# Altium footprint library ICS-43434_C5656610.PcbLib: 1 footprints
Each footprint in its own frame and in the unit in brackets; x right, y up, seen from the top. Pads: shape width x height; smd on the part's side, far side on the other; paste and mask are expansions set on the pad; w line width, h text height; cw(c..) or ccw(c..) is an arc to the next point about the centre after c.
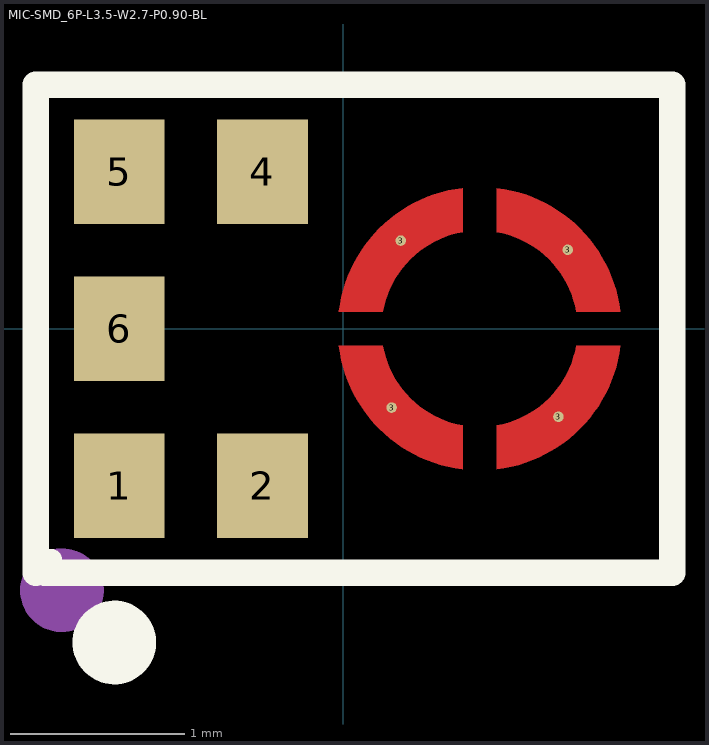
[diagram p0: the footprint, top view; thin cyan lines are the x and y axes]

## MIC-SMD_6P-L3.5-W2.7-P0.90-BL [mm] "1.65V~3.63V 停产 指向性:全指向 信噪比:64dB 灵敏度:-26dB 阻抗:- 型号:ICS-43434_C5656610 LCSC C5656610 厂牌:TDK InvenSense(应美盛)"
height 1
pads (9):
  rect 0.52x0.6 smd mask+0.05: 1(-1.286,-0.9) 2(-0.464,-0.9) 4(-0.464,0.9) 5(-1.286,0.9) 6(-1.286,0)
  round 0.06 smd mask+0: 3(0.276,-0.452) 3(0.329,0.505) 3(1.233,-0.505) 3(1.286,0.452)
Top Layer:
  region: -0.026,0.098 0.227,0.098 0.234,0.131 0.243,0.165 0.254,0.197 0.267,0.229 0.282,0.26 0.299,0.29 0.317,0.319 0.338,0.347 0.36,0.373 0.383,0.398 0.408,0.422 0.435,0.444 0.462,0.464 0.491,0.483 0.521,0.499 0.552,0.514 0.584,0.527 0.617,0.538 0.65,0.547 0.683,0.554 0.683,0.806 0.682,0.807 0.641,0.801 0.601,0.793 0.561,0.782 0.521,0.77 0.482,0.756 0.444,0.74 0.406,0.721 0.37,0.701 0.335,0.679 0.301,0.656 0.268,0.63 0.236,0.603 0.206,0.575 0.178,0.545 0.151,0.513 0.125,0.48 0.102,0.446 0.08,0.411 0.06,0.375 0.042,0.337 0.025,0.299 0.011,0.26 -0.001,0.221 -0.011,0.181 -0.02,0.14 -0.026,0.099
  region: 0.684,-0.807 0.684,-0.555 0.683,-0.554 0.65,-0.547 0.617,-0.538 0.584,-0.527 0.552,-0.514 0.521,-0.499 0.491,-0.483 0.462,-0.464 0.435,-0.444 0.408,-0.422 0.383,-0.398 0.36,-0.373 0.338,-0.347 0.317,-0.319 0.299,-0.29 0.282,-0.26 0.267,-0.229 0.254,-0.197 0.243,-0.165 0.234,-0.131 0.227,-0.098 -0.025,-0.098 -0.026,-0.099 -0.02,-0.14 -0.011,-0.18 -0.001,-0.221 0.011,-0.26 0.025,-0.299 0.042,-0.337 0.06,-0.375 0.08,-0.411 0.102,-0.446 0.125,-0.48 0.151,-0.513 0.178,-0.545 0.206,-0.575 0.236,-0.603 0.268,-0.63 0.301,-0.656 0.335,-0.679 0.37,-0.701 0.406,-0.721 0.444,-0.739 0.482,-0.756 0.521,-0.77 0.561,-0.782 0.601,-0.793 0.641,-0.801 0.682,-0.807
  region: 1.588,-0.098 1.336,-0.098 1.329,-0.131 1.32,-0.165 1.309,-0.197 1.296,-0.229 1.281,-0.26 1.264,-0.29 1.245,-0.319 1.225,-0.347 1.203,-0.373 1.179,-0.398 1.154,-0.422 1.128,-0.444 1.1,-0.464 1.071,-0.483 1.041,-0.499 1.01,-0.514 0.978,-0.527 0.946,-0.538 0.913,-0.547 0.879,-0.554 0.879,-0.806 0.88,-0.807 0.921,-0.801 0.962,-0.793 1.002,-0.782 1.042,-0.77 1.08,-0.756 1.119,-0.74 1.156,-0.721 1.192,-0.701 1.227,-0.679 1.262,-0.656 1.294,-0.63 1.326,-0.603 1.356,-0.575 1.385,-0.545 1.412,-0.513 1.437,-0.48 1.461,-0.446 1.482,-0.411 1.503,-0.375 1.521,-0.338 1.537,-0.299 1.551,-0.26 1.564,-0.221 1.574,-0.181 1.582,-0.14 1.588,-0.099
  region: 0.879,0.807 0.879,0.554 0.913,0.547 0.946,0.538 0.978,0.527 1.01,0.514 1.041,0.499 1.071,0.483 1.1,0.464 1.128,0.444 1.154,0.422 1.179,0.398 1.203,0.373 1.225,0.347 1.245,0.319 1.264,0.29 1.281,0.26 1.296,0.229 1.309,0.197 1.32,0.165 1.329,0.131 1.336,0.098 1.587,0.098 1.588,0.099 1.582,0.14 1.574,0.18 1.564,0.221 1.551,0.26 1.537,0.299 1.521,0.337 1.503,0.375 1.482,0.411 1.461,0.446 1.437,0.48 1.412,0.513 1.385,0.545 1.356,0.575 1.326,0.603 1.294,0.63 1.262,0.656 1.228,0.679 1.192,0.701 1.156,0.721 1.119,0.739 1.081,0.756 1.042,0.77 1.002,0.782 0.962,0.793 0.921,0.801 0.88,0.807
Top Overlay:
  circle w0.24: c-1.314,-1.8 r0.12
  region: -1.614,-1.325 -1.616,-1.313 -1.619,-1.302 -1.625,-1.292 -1.632,-1.283 -1.641,-1.275 -1.651,-1.27 -1.663,-1.266 -1.674,-1.265 -1.686,-1.266 -1.697,-1.27 -1.708,-1.275 -1.717,-1.283 -1.724,-1.292 -1.73,-1.302 -1.733,-1.313 -1.734,-1.325 -1.733,-1.337 -1.73,-1.348 -1.724,-1.358 -1.717,-1.367 -1.708,-1.375 -1.697,-1.38 -1.686,-1.384 -1.674,-1.385 -1.663,-1.384 -1.651,-1.38 -1.641,-1.375 -1.632,-1.367 -1.625,-1.358 -1.619,-1.348 -1.616,-1.337
  lines w0.152: -1.764,-1.4 -1.764,1.4 1.886,1.4 1.886,-1.4 -1.714,-1.4
Top Solder:
  drawing of 4 lines, arcs and shapes, not listed
Mechanical 2:
  circle w0.24: c-1.614,-1.5 r0.12
3D body "MIC-SMD_6P-L3.5-W2.7-P0.90-BL.step": height 1, standoff 0, extent -1.864,-2.02 1.986,1.5